# Altium footprint library FootPrintLib_12.PcbLib: 319 footprints (part 2 of 20)
Each footprint in its own frame and in the unit in brackets; x right, y up, seen from the top. Pads: shape width x height; smd on the part's side, far side on the other; paste and mask are expansions set on the pad; w line width, h text height; cw(c..) or ccw(c..) is an arc to the next point about the centre after c.
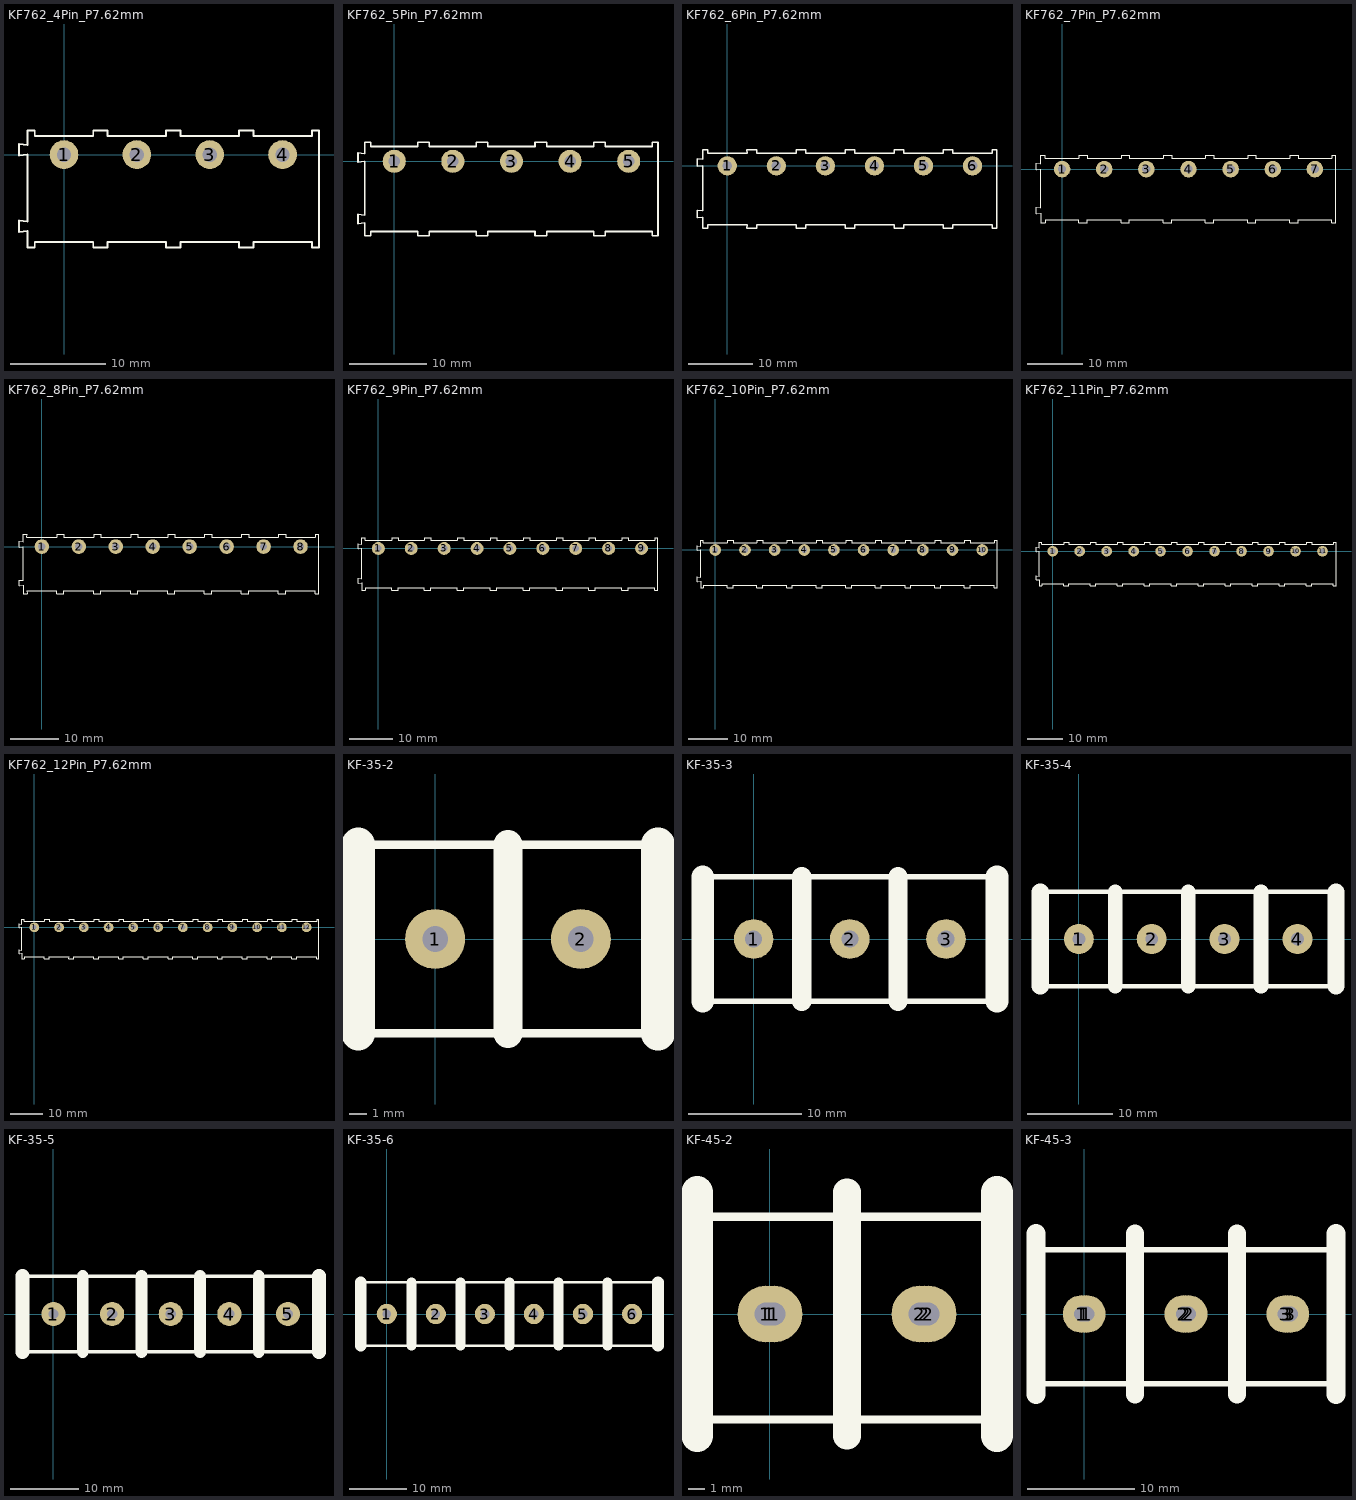
[diagram p1: the footprints below, top view; thin cyan lines are the x and y axes]

## KF762_4Pin_P7.62mm [mm] "Terminal Block; 4Pin; Pitch 7.62mm; Body 3138x1220mm"
height 12.4
pads (4):
  round 3 hole 1.5: 1(0,0) 2(7.62,0) 3(15.24,0) 4(22.86,0)
Top Overlay:
  lines w0.2: 25.92,-9.125 19.8,-9.125 19.8,-9.7 18.3,-9.7 18.3,-9.125 12.18,-9.125 12.18,-9.7 10.68,-9.7 10.68,-9.125 4.56,-9.125 4.56,-9.7 3.06,-9.7 3.06,-9.125 -3.065,-9.125 -3.06,-9.7 -3.81,-9.7 -3.81,-8 -4.71,-8.1 -4.71,-6.9 -3.81,-7 -3.81,0 -4.71,-0.1 -4.71,1.1 -3.81,1 -3.81,2.5 -3.06,2.5 -3.065,1.925 3.06,1.925 3.06,2.5 4.56,2.5 4.56,1.925 10.68,1.925 10.68,2.5 12.18,2.5 12.18,1.925 18.3,1.925 18.3,2.5 19.8,2.5 19.8,1.925 25.92,1.925 ; 25.92,-9.125 25.92,-9.7 26.67,-9.7 26.67,2.5 25.92,2.5 25.92,1.925
3D body "TBC762_4Pin.step": height 12.4, standoff -2.7, extent -4.71,-9.7 26.67,2.5

## KF762_5Pin_P7.62mm [mm] "Terminal Block; 5Pin; Pitch 7.62mm; Body 3900x1220mm"
height 12.4
pads (5):
  round 3 hole 1.5: 1(0,0) 2(7.62,0) 3(15.24,0) 4(22.86,0) 5(30.48,0)
Top Overlay:
  lines w0.2: 33.54,-9.125 27.42,-9.125 27.42,-9.7 25.92,-9.7 25.92,-9.125 19.8,-9.125 19.8,-9.7 18.3,-9.7 18.3,-9.125 12.18,-9.125 12.18,-9.7 10.68,-9.7 10.68,-9.125 4.56,-9.125 4.56,-9.7 3.06,-9.7 3.06,-9.125 -3.065,-9.125 -3.06,-9.7 -3.81,-9.7 -3.81,-8 -4.71,-8.1 -4.71,-6.9 -3.81,-7 -3.81,0 -4.71,-0.1 -4.71,1.1 -3.81,1 -3.81,2.5 -3.06,2.5 -3.065,1.925 3.06,1.925 3.06,2.5 4.56,2.5 4.56,1.925 10.68,1.925 10.68,2.5 12.18,2.5 12.18,1.925 18.3,1.925 18.3,2.5 19.8,2.5 19.8,1.925 25.92,1.925 25.92,2.5 27.42,2.5 27.42,1.925 33.54,1.925 ; 33.54,-9.125 33.54,-9.7 34.29,-9.7 34.29,2.5 33.54,2.5 33.54,1.925
3D body "TBC762_5Pin.step": height 12.4, standoff -2.7, extent -4.71,-9.7 34.29,2.5

## KF762_6Pin_P7.62mm [mm] "Terminal Block; 6Pin; Pitch 7.62mm; Body 4662x1220mm"
height 12.4
pads (6):
  round 3 hole 1.5: 1(0,0) 2(7.62,0) 3(15.24,0) 4(22.86,0) 5(30.48,0) 6(38.1,0)
Top Overlay:
  lines w0.2: 41.16,-9.125 35.04,-9.125 35.04,-9.7 33.54,-9.7 33.54,-9.125 27.42,-9.125 27.42,-9.7 25.92,-9.7 25.92,-9.125 19.8,-9.125 19.8,-9.7 18.3,-9.7 18.3,-9.125 12.18,-9.125 12.18,-9.7 10.68,-9.7 10.68,-9.125 4.56,-9.125 4.56,-9.7 3.06,-9.7 3.06,-9.125 -3.065,-9.125 -3.06,-9.7 -3.81,-9.7 -3.81,-8 -4.71,-8.1 -4.71,-6.9 -3.81,-7 -3.81,0 -4.71,-0.1 -4.71,1.1 -3.81,1 -3.81,2.5 -3.06,2.5 -3.065,1.925 3.06,1.925 3.06,2.5 4.56,2.5 4.56,1.925 10.68,1.925 10.68,2.5 12.18,2.5 12.18,1.925 18.3,1.925 18.3,2.5 19.8,2.5 19.8,1.925 25.92,1.925 25.92,2.5 27.42,2.5 27.42,1.925 33.54,1.925 33.54,2.5 35.04,2.5 35.04,1.925 41.16,1.925 ; 41.16,-9.125 41.16,-9.7 41.91,-9.7 41.91,2.5 41.16,2.5 41.16,1.925
3D body "TBC762_6Pin.step": height 12.4, standoff -2.7, extent -4.71,-9.7 41.91,2.5

## KF762_7Pin_P7.62mm [mm] "Terminal Block; 7Pin; Pitch 7.62mm; Body 5424x1220mm"
height 12.4
pads (7):
  round 3 hole 1.5: 1(0,0) 2(7.62,0) 3(15.24,0) 4(22.86,0) 5(30.48,0) 6(38.1,0) 7(45.72,0)
Top Overlay:
  lines w0.2: 48.78,-9.125 42.66,-9.125 42.66,-9.7 41.16,-9.7 41.16,-9.125 35.04,-9.125 35.04,-9.7 33.54,-9.7 33.54,-9.125 27.42,-9.125 27.42,-9.7 25.92,-9.7 25.92,-9.125 19.8,-9.125 19.8,-9.7 18.3,-9.7 18.3,-9.125 12.18,-9.125 12.18,-9.7 10.68,-9.7 10.68,-9.125 4.56,-9.125 4.56,-9.7 3.06,-9.7 3.06,-9.125 -3.065,-9.125 -3.06,-9.7 -3.81,-9.7 -3.81,-8 -4.71,-8.1 -4.71,-6.9 -3.81,-7 -3.81,0 -4.71,-0.1 -4.71,1.1 -3.81,1 -3.81,2.5 -3.06,2.5 -3.065,1.925 3.06,1.925 3.06,2.5 4.56,2.5 4.56,1.925 10.68,1.925 10.68,2.5 12.18,2.5 12.18,1.925 18.3,1.925 18.3,2.5 19.8,2.5 19.8,1.925 25.92,1.925 25.92,2.5 27.42,2.5 27.42,1.925 33.54,1.925 33.54,2.5 35.04,2.5 35.04,1.925 41.16,1.925 41.16,2.5 42.66,2.5 42.66,1.925 48.78,1.925 ; 48.78,-9.125 48.78,-9.7 49.53,-9.7 49.53,2.5 48.78,2.5 48.78,1.925
3D body "TBC762_7Pin.step": height 12.4, standoff -2.7, extent -4.71,-9.7 49.53,2.5

## KF762_8Pin_P7.62mm [mm] "Terminal Block; 8Pin; Pitch 7.62mm; Body 6186x1220mm"
height 12.4
pads (8):
  round 3 hole 1.5: 1(0,0) 2(7.62,0) 3(15.24,0) 4(22.86,0) 5(30.48,0) 6(38.1,0) 7(45.72,0) 8(53.34,0)
Top Overlay:
  lines w0.2: 56.4,-9.125 50.28,-9.125 50.28,-9.7 48.78,-9.7 48.78,-9.125 42.66,-9.125 42.66,-9.7 41.16,-9.7 41.16,-9.125 35.04,-9.125 35.04,-9.7 33.54,-9.7 33.54,-9.125 27.42,-9.125 27.42,-9.7 25.92,-9.7 25.92,-9.125 19.8,-9.125 19.8,-9.7 18.3,-9.7 18.3,-9.125 12.18,-9.125 12.18,-9.7 10.68,-9.7 10.68,-9.125 4.56,-9.125 4.56,-9.7 3.06,-9.7 3.06,-9.125 -3.065,-9.125 -3.06,-9.7 -3.81,-9.7 -3.81,-8 -4.71,-8.1 -4.71,-6.9 -3.81,-7 -3.81,0 -4.71,-0.1 -4.71,1.1 -3.81,1 -3.81,2.5 -3.06,2.5 -3.065,1.925 3.06,1.925 3.06,2.5 4.56,2.5 4.56,1.925 10.68,1.925 10.68,2.5 12.18,2.5 12.18,1.925 18.3,1.925 18.3,2.5 19.8,2.5 19.8,1.925 25.92,1.925 25.92,2.5 27.42,2.5 27.42,1.925 33.54,1.925 33.54,2.5 35.04,2.5 35.04,1.925 41.16,1.925 41.16,2.5 42.66,2.5 42.66,1.925 48.78,1.925 48.78,2.5 50.28,2.5 50.28,1.925 56.4,1.925 ; 56.4,-9.125 56.4,-9.7 57.15,-9.7 57.15,2.5 56.4,2.5 56.4,1.925
3D body "TBC762_8Pin.step": height 12.4, standoff -2.7, extent -4.71,-9.7 57.15,2.5

## KF762_9Pin_P7.62mm [mm] "Terminal Block; 9Pin; Pitch 7.62mm; Body 6948x1220mm"
height 12.4
pads (9):
  round 3 hole 1.5: 1(0,0) 2(7.62,0) 3(15.24,0) 4(22.86,0) 5(30.48,0) 6(38.1,0) 7(45.72,0) 8(53.34,0) 9(60.96,0)
Top Overlay:
  lines w0.2: 64.02,-9.125 57.9,-9.125 57.9,-9.7 56.4,-9.7 56.4,-9.125 50.28,-9.125 50.28,-9.7 48.78,-9.7 48.78,-9.125 42.66,-9.125 42.66,-9.7 41.16,-9.7 41.16,-9.125 35.04,-9.125 35.04,-9.7 33.54,-9.7 33.54,-9.125 27.42,-9.125 27.42,-9.7 25.92,-9.7 25.92,-9.125 19.8,-9.125 19.8,-9.7 18.3,-9.7 18.3,-9.125 12.18,-9.125 12.18,-9.7 10.68,-9.7 10.68,-9.125 4.56,-9.125 4.56,-9.7 3.06,-9.7 3.06,-9.125 -3.065,-9.125 -3.06,-9.7 -3.81,-9.7 -3.81,-8 -4.71,-8.1 -4.71,-6.9 -3.81,-7 -3.81,0 -4.71,-0.1 -4.71,1.1 -3.81,1 -3.81,2.5 -3.06,2.5 -3.065,1.925 3.06,1.925 3.06,2.5 4.56,2.5 4.56,1.925 10.68,1.925 10.68,2.5 12.18,2.5 12.18,1.925 18.3,1.925 18.3,2.5 19.8,2.5 19.8,1.925 25.92,1.925 25.92,2.5 27.42,2.5 27.42,1.925 33.54,1.925 33.54,2.5 35.04,2.5 35.04,1.925 41.16,1.925 41.16,2.5 42.66,2.5 42.66,1.925 48.78,1.925 48.78,2.5 50.28,2.5 50.28,1.925 56.4,1.925 56.4,2.5 57.9,2.5 57.9,1.925 64.02,1.925 ; 64.02,-9.125 64.02,-9.7 64.77,-9.7 64.77,2.5 64.02,2.5 64.02,1.925
3D body "TBC762_9Pin.step": height 12.4, standoff -2.7, extent -4.71,-9.7 64.77,2.5

## KF762_10Pin_P7.62mm [mm] "Terminal Block; 10Pin; Pitch 7.62mm; Body 7710x1220mm"
height 12.4
pads (10):
  round 3 hole 1.5: 1(0,0) 2(7.62,0) 3(15.24,0) 4(22.86,0) 5(30.48,0) 6(38.1,0) 7(45.72,0) 8(53.34,0) 9(60.96,0) 10(68.58,0)
Top Overlay:
  lines w0.2: 71.64,-9.125 65.52,-9.125 65.52,-9.7 64.02,-9.7 64.02,-9.125 57.9,-9.125 57.9,-9.7 56.4,-9.7 56.4,-9.125 50.28,-9.125 50.28,-9.7 48.78,-9.7 48.78,-9.125 42.66,-9.125 42.66,-9.7 41.16,-9.7 41.16,-9.125 35.04,-9.125 35.04,-9.7 33.54,-9.7 33.54,-9.125 27.42,-9.125 27.42,-9.7 25.92,-9.7 25.92,-9.125 19.8,-9.125 19.8,-9.7 18.3,-9.7 18.3,-9.125 12.18,-9.125 12.18,-9.7 10.68,-9.7 10.68,-9.125 4.56,-9.125 4.56,-9.7 3.06,-9.7 3.06,-9.125 -3.065,-9.125 -3.06,-9.7 -3.81,-9.7 -3.81,-8 -4.71,-8.1 -4.71,-6.9 -3.81,-7 -3.81,0 -4.71,-0.1 -4.71,1.1 -3.81,1 -3.81,2.5 -3.06,2.5 -3.065,1.925 3.06,1.925 3.06,2.5 4.56,2.5 4.56,1.925 10.68,1.925 10.68,2.5 12.18,2.5 12.18,1.925 18.3,1.925 18.3,2.5 19.8,2.5 19.8,1.925 25.92,1.925 25.92,2.5 27.42,2.5 27.42,1.925 33.54,1.925 33.54,2.5 35.04,2.5 35.04,1.925 41.16,1.925 41.16,2.5 42.66,2.5 42.66,1.925 48.78,1.925 48.78,2.5 50.28,2.5 50.28,1.925 56.4,1.925 56.4,2.5 57.9,2.5 57.9,1.925 64.02,1.925 64.02,2.5 65.52,2.5 65.52,1.925 71.64,1.925 ; 71.64,-9.125 71.64,-9.7 72.39,-9.7 72.39,2.5 71.64,2.5 71.64,1.925
3D body "TBC762_10Pin.step": height 12.4, standoff -2.7, extent -4.71,-9.7 72.39,2.5

## KF762_11Pin_P7.62mm [mm] "Terminal Block; 11Pin; Pitch 7.62mm; Body 8472x1220mm"
height 12.4
pads (11):
  round 3 hole 1.5: 1(0,0) 2(7.62,0) 3(15.24,0) 4(22.86,0) 5(30.48,0) 6(38.1,0) 7(45.72,0) 8(53.34,0) 9(60.96,0) 10(68.58,0) 11(76.2,0)
Top Overlay:
  lines w0.2: 79.26,-9.125 73.14,-9.125 73.14,-9.7 71.64,-9.7 71.64,-9.125 65.52,-9.125 65.52,-9.7 64.02,-9.7 64.02,-9.125 57.9,-9.125 57.9,-9.7 56.4,-9.7 56.4,-9.125 50.28,-9.125 50.28,-9.7 48.78,-9.7 48.78,-9.125 42.66,-9.125 42.66,-9.7 41.16,-9.7 41.16,-9.125 35.04,-9.125 35.04,-9.7 33.54,-9.7 33.54,-9.125 27.42,-9.125 27.42,-9.7 25.92,-9.7 25.92,-9.125 19.8,-9.125 19.8,-9.7 18.3,-9.7 18.3,-9.125 12.18,-9.125 12.18,-9.7 10.68,-9.7 10.68,-9.125 4.56,-9.125 4.56,-9.7 3.06,-9.7 3.06,-9.125 -3.065,-9.125 -3.06,-9.7 -3.81,-9.7 -3.81,-8 -4.71,-8.1 -4.71,-6.9 -3.81,-7 -3.81,0 -4.71,-0.1 -4.71,1.1 -3.81,1 -3.81,2.5 -3.06,2.5 -3.065,1.925 3.06,1.925 3.06,2.5 4.56,2.5 4.56,1.925 10.68,1.925 10.68,2.5 12.18,2.5 12.18,1.925 18.3,1.925 18.3,2.5 19.8,2.5 19.8,1.925 25.92,1.925 25.92,2.5 27.42,2.5 27.42,1.925 33.54,1.925 33.54,2.5 35.04,2.5 35.04,1.925 41.16,1.925 41.16,2.5 42.66,2.5 42.66,1.925 48.78,1.925 48.78,2.5 50.28,2.5 50.28,1.925 56.4,1.925 56.4,2.5 57.9,2.5 57.9,1.925 64.02,1.925 64.02,2.5 65.52,2.5 65.52,1.925 71.64,1.925 71.64,2.5 73.14,2.5 73.14,1.925 79.26,1.925 ; 79.26,-9.125 79.26,-9.7 80.01,-9.7 80.01,2.5 79.26,2.5 79.26,1.925
3D body "TBC762_11Pin.step": height 12.4, standoff -2.7, extent -4.71,-9.7 80.01,2.5

## KF762_12Pin_P7.62mm [mm] "Terminal Block; 12Pin; Pitch 7.62mm; Body 9234x1220mm"
height 12.4
pads (12):
  round 3 hole 1.5: 1(0,0) 2(7.62,0) 3(15.24,0) 4(22.86,0) 5(30.48,0) 6(38.1,0) 7(45.72,0) 8(53.34,0) 9(60.96,0) 10(68.58,0) 11(76.2,0) 12(83.82,0)
Top Overlay:
  lines w0.2: -4.71,-8.1 -3.81,-8 -3.81,-9.7 -3.06,-9.7 -3.065,-9.125 3.06,-9.125 3.06,-9.7 4.56,-9.7 4.56,-9.125 10.68,-9.125 10.68,-9.7 12.18,-9.7 12.18,-9.125 18.3,-9.125 18.3,-9.7 19.8,-9.7 19.8,-9.125 25.92,-9.125 25.92,-9.7 27.42,-9.7 27.42,-9.125 33.54,-9.125 33.54,-9.7 35.04,-9.7 35.04,-9.125 41.16,-9.125 41.16,-9.7 42.66,-9.7 42.66,-9.125 48.78,-9.125 48.78,-9.7 50.28,-9.7 50.28,-9.125 56.4,-9.125 56.4,-9.7 57.9,-9.7 57.9,-9.125 64.02,-9.125 64.02,-9.7 65.52,-9.7 65.52,-9.125 71.64,-9.125 71.64,-9.7 73.14,-9.7 73.14,-9.125 79.26,-9.125 79.26,-9.7 80.76,-9.7 80.76,-9.125 86.88,-9.125 86.88,-9.7 87.63,-9.7 87.63,2.5 86.88,2.5 86.88,1.925 80.76,1.925 80.76,2.5 79.26,2.5 79.26,1.925 73.14,1.925 73.14,2.5 71.64,2.5 71.64,1.925 65.52,1.925 65.52,2.5 64.02,2.5 64.02,1.925 57.9,1.925 57.9,2.5 56.4,2.5 56.4,1.925 50.28,1.925 50.28,2.5 48.78,2.5 48.78,1.925 42.66,1.925 42.66,2.5 41.16,2.5 41.16,1.925 35.04,1.925 35.04,2.5 33.54,2.5 33.54,1.925 27.42,1.925 27.42,2.5 25.92,2.5 25.92,1.925 19.8,1.925 19.8,2.5 18.3,2.5 18.3,1.925 12.18,1.925 12.18,2.5 10.68,2.5 10.68,1.925 4.56,1.925 4.56,2.5 3.06,2.5 3.06,1.925 -3.065,1.925 -3.06,2.5 -3.81,2.5 -3.81,1 -4.71,1.1 -4.71,-0.1 -3.81,0 -3.81,-7 -4.71,-6.9 -4.71,-8.1
3D body "TB762_12Pin.step": height 12.4, standoff -2.7, extent -4.71,-9.7 87.63,2.5

## KF-35-2 [mm]
pads (2):
  round 3.5 hole 1.5: 1(0,0) 2(8.5,0)
Top Overlay:
  lines w0.508: -4.5,-5.5 13,-5.5 ; -4.5,5.5 13,5.5
  lines w1.7: 4.25,-5.5 4.25,5.5
  lines w2: -4.5,-5.5 -4.5,5.5 ; 13,-5.5 13,5.5

## KF-35-3 [mm]
pads (3):
  round 3.5 hole 1.5: 1(0,0) 2(8.5,0) 3(17,0)
Top Overlay:
  lines w0.508: -5,5.5 21.5,5.5 ; -4.5,-5.5 21.5,-5.5
  lines w1.7: 4.25,-5.5 4.25,5.5 ; 12.75,-5.5 12.75,5.5
  lines w2: -4.5,-5.5 -4.5,5.5 ; 21.5,-5.5 21.5,5.5

## KF-35-4 [mm]
pads (4):
  round 3.5 hole 1.5: 1(0,0) 2(8.5,0) 3(17,0) 4(25.5,0)
Top Overlay:
  lines w0.508: -5,5.5 30,5.5 ; -4.5,-5.5 30,-5.5
  lines w1.7: 4.25,-5.5 4.25,5.5 ; 12.75,-5.5 12.75,5.5 ; 21.25,-5.5 21.25,5.5
  lines w2: -4.5,-5.5 -4.5,5.5 ; 30,-5.5 30,5.5

## KF-35-5 [mm]
pads (5):
  round 3.5 hole 1.5: 1(0,0) 2(8.5,0) 3(17,0) 4(25.5,0) 5(34,0)
Top Overlay:
  lines w0.508: -5,5.5 38.5,5.5 ; -4.5,-5.5 38.5,-5.5
  lines w1.7: 4.25,-5.5 4.25,5.5 ; 12.75,-5.5 12.75,5.5 ; 21.25,-5.5 21.25,5.5 ; 29.75,-5.5 29.75,5.5
  lines w2: -4.5,-5.5 -4.5,5.5 ; 38.5,-5.5 38.5,5.5

## KF-35-6 [mm]
pads (6):
  round 3.5 hole 1.5: 1(0,0) 2(8.5,0) 3(17,0) 4(25.5,0) 5(34,0) 6(42.5,0)
Top Overlay:
  lines w0.508: -5,5.5 47,5.5 ; -4.5,-5.5 47,-5.5
  lines w1.7: 4.25,-5.5 4.25,5.5 ; 12.75,-5.5 12.75,5.5 ; 21.25,-5.5 21.25,5.5 ; 29.75,-5.5 29.75,5.5 ; 38.25,-5.5 38.25,5.5
  lines w2: -4.5,-5.5 -4.5,5.5 ; 47,-5.5 47,5.5

## KF-45-2 [mm]
pads (6):
  round 3.5 hole 1.4: 1(-0.25,0) 1(0,0) 1(0.25,0) 2(9.25,0) 2(9.5,0) 2(9.75,0)
Top Overlay:
  lines w0.508: -4.5,-6.5 14,-6.5 ; -4.5,6 14,6
  lines w1.7: 4.75,-7.5 4.75,7.5
  lines w2: -4.5,-7.5 -4.5,7.5 ; 14,-7.5 14,7.5

## KF-45-3 [mm]
pads (9):
  round 3.5 hole 1.4: 1(-0.25,0) 1(0,0) 1(0.25,0) 2(9.25,0) 2(9.5,0) 2(9.75,0) 3(18.75,0) 3(19,0) 3(19.25,0)
Top Overlay:
  lines w0.508: -4.5,-6.5 23.5,-6.5 ; -4.5,6 23.5,6
  lines w1.7: 4.75,-7.5 4.75,7.5 ; 14.25,-7.5 14.25,7.5
  lines w1.8: -4.5,-7.5 -4.5,7.5 ; 23.5,-7.5 23.5,7.5